# Altium integrated library CONNECTORS.IntLib: 2 symbols
Pins are listed as number, name and electrical type; pins without a type are passive.

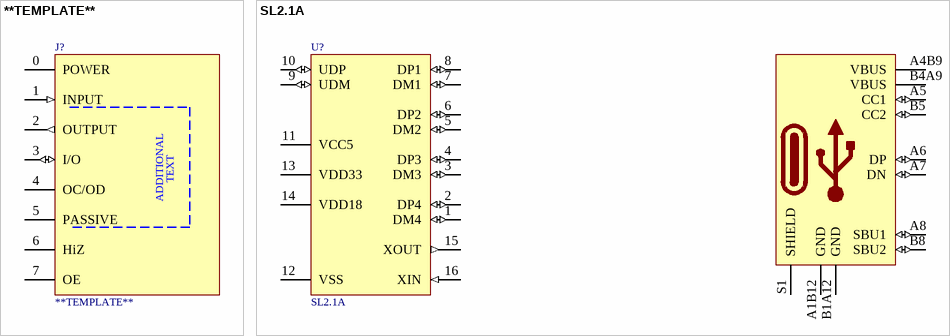
[diagram p0: symbols **TEMPLATE** to SL2.1A]

## **TEMPLATE**
designator J?
PLEASE COPY TO CREATE NEW COMPONENT; Pitch: *; Positions: *; Rows: *; Orientation: *; Mounting Type: *; Usage: *; Manufacturer 1: *; Part Number 1: *; Manufacturer 2: *; Part Number 2: *
pins: 0 POWER (power), 1 INPUT (in), 2 OUTPUT (out), 3 I/O (io), 4 OC/OD (oc), 5 PASSIVE (oc), 6 HiZ (hiz), 7 OE (oe)
text: ADDITIONAL; TEXT

## SL2.1A
designator U?
USB2.0 High Speed 4-port HUB COntroller; Manufacturer 1: Corechips; Function: USB HUB; Package: SOP16; Mounting Type: SMT; Part Number 1: SL2.1A
pins: 1 DM4 (io), 2 DP4 (io), 3 DM3 (io), 4 DP3 (io), 5 DM2 (io), 6 DP2 (io), 7 DM1 (io), 8 DP1 (io), 9 UDM (io), 10 UDP (io), 11 VCC5 (power), 12 VSS (power), 13 VDD33 (power), 14 VDD18 (power), 15 XOUT (out), 16 XIN (in), A1B12 GND (power), A4B9 VBUS (power), A5 CC1 (io), A6 DP (io), A7 DN (io), A8 SBU1 (io), B1A12 GND (power), B4A9 VBUS (power), B5 CC2 (io), B8 SBU2 (io), S1 SHIELD